# Altium footprint library UNIV_CAP.PcbLib: 1 footprints
Each footprint in its own frame and in the unit in brackets; x right, y up, seen from the top. Pads: shape width x height; smd on the part's side, far side on the other; paste and mask are expansions set on the pad; w line width, h text height; cw(c..) or ccw(c..) is an arc to the next point about the centre after c.
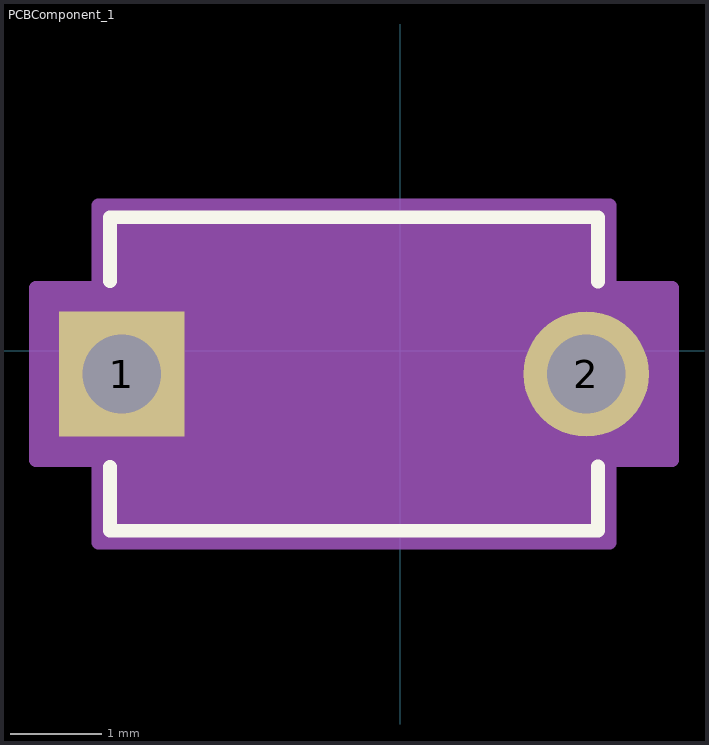
[diagram p0: the footprint, top view; thin cyan lines are the x and y axes]

## PCBComponent_1 [mil]
pads (2):
  rect 54x54 hole 34 paste-99999 mask+0: 1(-120,-10)
  round 54 hole 34 paste-99999 mask+0: 2(80,-10)
Top Overlay:
  lines w6: -125,-50.1 -125,-77.5 85,-77.5 85,-49.79 ; -125,30.1 -125,57.5 85,57.5 85,29.79
Mechanical 13:
  lines w1: -120,-72.5 80,-72.5 80,52.5 -120,52.5 -120,-72.5
Mechanical 15:
  region: 80,-72.5 -120,-72.5 -120,52.5 80,52.5
  region: -120,-47 -157,-47 -157,27 -120,27
  region: 80,-47 117,-47 117,27 80,27
  region: 90,-82.5 -130,-82.5 -130,62.5 90,62.5
  lines w6: -157,-47 -157,27 -130,27 -130,62.5 90,62.5 90,27 117,27 117,-47 90,-47 90,-82.5 -130,-82.5 -130,-47 -157,-47
3D body "C322C103K5R5TA.step": height 259.84, standoff -275.59, extent -130.04,-75.59 90.04,49.61